# Altium schematic symbol library Switch.SchLib: 1 symbol
Pins are listed as number, name and electrical type; pins without a type are passive.

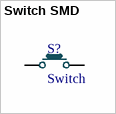
[diagram p0: symbol Switch SMD]

## Switch SMD
designator S?, comment Switch
footprint Switch-2
footprint Switch-4
pins: 1, 2